# Altium schematic symbol library 1812L300_24SLER.SchLib: 1 symbol
Pins are listed as number, name and electrical type; pins without a type are passive.

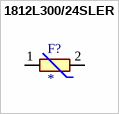
[diagram p0: symbol 1812L300/24SLER]

## 1812L300/24SLER
designator F?
Polymeric PTC Resettable Fuse 24V 3 A Ih Surface Mount 1812 (4532 Metric), Concave; MF: Littelfuse Inc.; MP: 1812L300/24SLER; Check_prices: https://www.snapeda.com/parts/1812L300/24SLER/Littelfuse/view-part/?ref=eda; Availability: In Stock; Price: None; Package: None; Value: *; SnapEDA_Link: https://www.snapeda.com/parts/1812L300/24SLER/Littelfuse/view-part/?ref=snap; Purchase-URL: https://pricing.snapeda.com/search/part/1812L300/24SLER/?ref=eda
footprint FUSSC324X455X250-2N
pins: 1, 2